# Altium footprint library TPSM82913RDUR.PcbLib: 1 footprints
Each footprint in its own frame and in the unit in brackets; x right, y up, seen from the top. Pads: shape width x height; smd on the part's side, far side on the other; paste and mask are expansions set on the pad; w line width, h text height; cw(c..) or ccw(c..) is an arc to the next point about the centre after c.
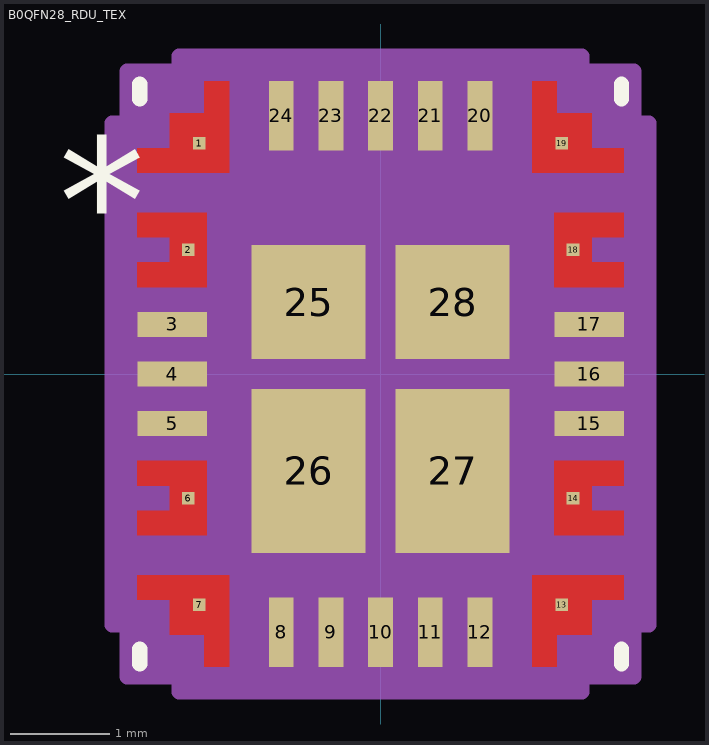
[diagram p0: the footprint, top view; thin cyan lines are the x and y axes]

## B0QFN28_RDU_TEX [mm]
pads (28):
  rect 0.127x0.127 smd paste-0.064 mask-0.064: 1(-1.825,2.325) 2(-1.937,1.25) 6(-1.937,-1.25) 7(-1.825,-2.325) 13(1.825,-2.325) 14(1.937,-1.25) 18(1.937,1.25) 19(1.825,2.325)
  rect 0.7x0.25 smd paste+0 mask+0: 3(-2.1,0.5) 4(-2.1,0) 5(-2.1,-0.5) 15(2.1,-0.5) 16(2.1,0) 17(2.1,0.5)
  rect 0.25x0.7 smd paste+0 mask+0: 8(-1,-2.6) 9(-0.5,-2.6) 10(0,-2.6) 11(0.5,-2.6) 12(1,-2.6) 20(1,2.6) 21(0.5,2.6) 22(0,2.6) 23(-0.5,2.6) 24(-1,2.6)
  rect 1.15x1.15 smd paste+0 mask+0: 25(-0.725,0.725) 28(0.725,0.725)
  rect 1.15x1.65 smd paste+0 mask+0: 26(-0.725,-0.975) 27(0.725,-0.975)
Top Layer:
  region: 1.525,-2.025 2.45,-2.025 2.45,-2.275 2.125,-2.275 2.125,-2.625 1.775,-2.625 1.775,-2.95 1.525,-2.95
  region: -1.525,2.025 -2.45,2.025 -2.45,2.275 -2.125,2.275 -2.125,2.625 -1.775,2.625 -1.775,2.95 -1.525,2.95
  region: -1.75,1.625 -2.45,1.625 -2.45,1.375 -2.125,1.375 -2.125,1.125 -2.45,1.125 -2.45,0.875 -1.75,0.875
  region: 1.525,2.025 2.45,2.025 2.45,2.275 2.125,2.275 2.125,2.625 1.775,2.625 1.775,2.95 1.525,2.95
  region: 1.75,1.625 2.45,1.625 2.45,1.375 2.125,1.375 2.125,1.125 2.45,1.125 2.45,0.875 1.75,0.875
  region: 1.75,-1.625 2.45,-1.625 2.45,-1.375 2.125,-1.375 2.125,-1.125 2.45,-1.125 2.45,-0.875 1.75,-0.875
  region: -1.75,-1.625 -2.45,-1.625 -2.45,-1.375 -2.125,-1.375 -2.125,-1.125 -2.45,-1.125 -2.45,-0.875 -1.75,-0.875
  region: -1.525,-2.025 -2.45,-2.025 -2.45,-2.275 -2.125,-2.275 -2.125,-2.625 -1.775,-2.625 -1.775,-2.95 -1.525,-2.95
Top Overlay:
  lines w0.152: -2.426,-2.921 -2.426,-2.767 ; -2.426,2.767 -2.426,2.921 ; 2.426,-2.921 2.426,-2.767 ; 2.426,2.767 2.426,2.921
  text "*" at -3.24,1.115 h1.27
  text ".Designator" at -3.492,-0.635 h1.27
Top Paste:
  region: 1.525,-2.025 2.45,-2.025 2.45,-2.275 2.125,-2.275 2.125,-2.625 1.775,-2.625 1.775,-2.95 1.525,-2.95
  region: -1.525,-2.025 -2.45,-2.025 -2.45,-2.275 -2.125,-2.275 -2.125,-2.625 -1.775,-2.625 -1.775,-2.95 -1.525,-2.95
  region: -1.525,2.025 -2.45,2.025 -2.45,2.275 -2.125,2.275 -2.125,2.625 -1.775,2.625 -1.775,2.95 -1.525,2.95
  region: -1.75,1.625 -2.45,1.625 -2.45,1.375 -2.125,1.375 -2.125,1.125 -2.45,1.125 -2.45,0.875 -1.75,0.875
  region: 1.525,2.025 2.45,2.025 2.45,2.275 2.125,2.275 2.125,2.625 1.775,2.625 1.775,2.95 1.525,2.95
  region: 1.75,1.625 2.45,1.625 2.45,1.375 2.125,1.375 2.125,1.125 2.45,1.125 2.45,0.875 1.75,0.875
  region: 1.75,-1.625 2.45,-1.625 2.45,-1.375 2.125,-1.375 2.125,-1.125 2.45,-1.125 2.45,-0.875 1.75,-0.875
  region: -1.75,-1.625 -2.45,-1.625 -2.45,-1.375 -2.125,-1.375 -2.125,-1.125 -2.45,-1.125 -2.45,-0.875 -1.75,-0.875
Top Solder:
  region: 1.525,-2.025 2.45,-2.025 2.45,-2.275 2.125,-2.275 2.125,-2.625 1.775,-2.625 1.775,-2.95 1.525,-2.95
  region: -1.525,-2.025 -2.45,-2.025 -2.45,-2.275 -2.125,-2.275 -2.125,-2.625 -1.775,-2.625 -1.775,-2.95 -1.525,-2.95
  region: -1.525,2.025 -2.45,2.025 -2.45,2.275 -2.125,2.275 -2.125,2.625 -1.775,2.625 -1.775,2.95 -1.525,2.95
  region: -1.75,1.625 -2.45,1.625 -2.45,1.375 -2.125,1.375 -2.125,1.125 -2.45,1.125 -2.45,0.875 -1.75,0.875
  region: 1.525,2.025 2.45,2.025 2.45,2.275 2.125,2.275 2.125,2.625 1.775,2.625 1.775,2.95 1.525,2.95
  region: 1.75,1.625 2.45,1.625 2.45,1.375 2.125,1.375 2.125,1.125 2.45,1.125 2.45,0.875 1.75,0.875
  region: 1.75,-1.625 2.45,-1.625 2.45,-1.375 2.125,-1.375 2.125,-1.125 2.45,-1.125 2.45,-0.875 1.75,-0.875
  region: -1.75,-1.625 -2.45,-1.625 -2.45,-1.375 -2.125,-1.375 -2.125,-1.125 -2.45,-1.125 -2.45,-0.875 -1.75,-0.875
Mechanical 13:
  lines w0.025: -2.299,-2.794 2.299,-2.794 2.299,2.794 -2.299,2.794 -2.299,-2.794
  text ".Designator" at -3.492,-0.635 h1.27
  text "*" at -1.432,1.365 h1.27
Mechanical 15:
  region: 2.029,3.204 -2.029,3.204 -2.029,3.048 -2.553,3.048 -2.54,2.54 -2.704,2.529 -2.704,-2.529 -2.553,-2.529 -2.553,-3.048 -2.029,-3.048 -2.029,-3.204 2.029,-3.204 2.029,-3.048 2.553,-3.048 2.553,-2.529 2.704,-2.529 2.704,2.529 2.553,2.529 2.553,3.048 2.029,3.048
  lines w0.152: -2.704,-2.529 -2.704,2.529 -2.553,2.529 -2.553,3.048 -2.029,3.048 -2.029,3.204 2.029,3.204 2.029,3.048 2.553,3.048 2.553,2.529 2.704,2.529 2.704,-2.529 2.553,-2.529 2.553,-3.048 2.029,-3.048 2.029,-3.204 -2.029,-3.204 -2.029,-3.048 -2.553,-3.048 -2.553,-2.529 -2.704,-2.529